# Altium footprint library STPMotorControl_1.PcbLib: 81 footprints (part 6 of 6)
Each footprint in its own frame and in the unit in brackets; x right, y up, seen from the top. Pads: shape width x height; smd on the part's side, far side on the other; paste and mask are expansions set on the pad; w line width, h text height; cw(c..) or ccw(c..) is an arc to the next point about the centre after c.
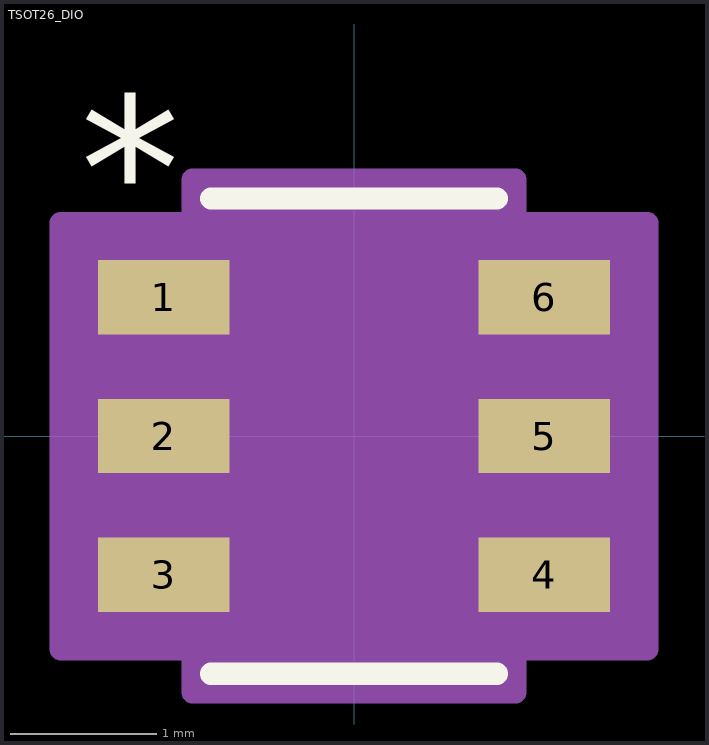
[diagram p5: the footprint, top view; thin cyan lines are the x and y axes]

## TSOT26_DIO [mil]
pads (6):
  rect 35.5x20 smd paste+0 mask+0: 1(-51.25,37.4) 2(-51.25,0) 3(-51.25,-37.4) 4(51.25,-37.4) 5(51.25,0) 6(51.25,37.4)
Top Overlay:
  lines w6: -38.5,-64 38.5,-64 ; -38.5,64 38.5,64
  text ".Designator" at -137.5,-25 h50
  text "*" at -73.75,52.4 h50
Mechanical 13:
  lines w1: -12,59 ccw(c0,59) 12,59 ; -55,-46.4 -55,-28.4 -33.5,-28.4 -33.5,-46.4 -55,-46.4 ; -55,-9 -55,9 -33.5,9 -33.5,-9 -55,-9 ; -55,28.4 -55,46.4 -33.5,46.4 -33.5,28.4 -55,28.4 ; -33.5,-59 33.5,-59 33.5,59 -33.5,59 -33.5,-59 ; 33.5,-46.4 33.5,-28.4 55,-28.4 55,-46.4 33.5,-46.4 ; 33.5,-9 33.5,9 55,9 55,-9 33.5,-9 ; 33.5,28.4 33.5,46.4 55,46.4 55,28.4 33.5,28.4
  text "*" at -31,6 h50
  text ".Designator" at -137.5,-25 h50
Mechanical 15:
  region: -43.5,-57.4 -79,-57.4 -79,57.4 -43.5,57.4 -43.5,69 43.5,69 43.5,57.4 79,57.4 79,-57.4 43.5,-57.4 43.5,-69 -43.5,-69
  lines w6: -79,-57.4 -79,57.4 -43.5,57.4 -43.5,69 43.5,69 43.5,57.4 79,57.4 79,-57.4 43.5,-57.4 43.5,-69 -43.5,-69 -43.5,-57.4 -79,-57.4
3D body "TSOT26_DIO.step": height 39.09, standoff 0, extent -55,-59.02 55,59.02